# Altium footprint library 加热模块V2.4.PcbLib: 33 footprints (part 3 of 3)
Each footprint in its own frame and in the unit in brackets; x right, y up, seen from the top. Pads: shape width x height; smd on the part's side, far side on the other; paste and mask are expansions set on the pad; w line width, h text height; cw(c..) or ccw(c..) is an arc to the next point about the centre after c.
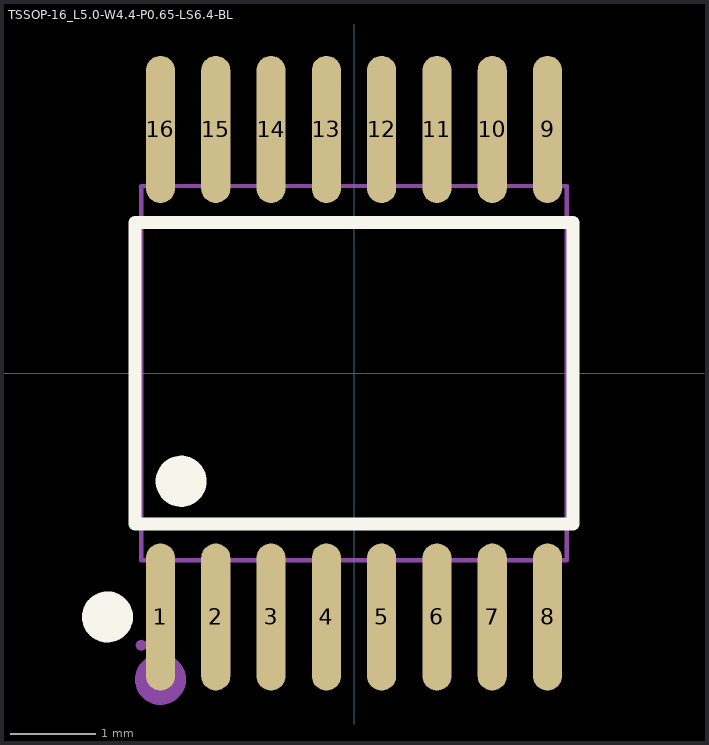
[diagram p2: the footprint, top view; thin cyan lines are the x and y axes]

## TSSOP-16_L5.0-W4.4-P0.65-LS6.4-BL [mm]
pads (16):
  oval 0.343x1.731 smd: 1(-2.275,-2.866) 2(-1.625,-2.866) 3(-0.975,-2.866) 4(-0.325,-2.866) 5(0.325,-2.866) 6(0.975,-2.866) 7(1.625,-2.866) 8(2.275,-2.866) 9(2.275,2.866) 10(1.625,2.866) 11(0.975,2.866) 12(0.325,2.866) 13(-0.325,2.866) 14(-0.975,2.866) 15(-1.625,2.866) 16(-2.275,2.866)
Top Overlay:
  circle w0.3: c-2.899,-2.866 r0.15
  circle w0.3: c-2.032,-1.27 r0.15
  lines w0.152: -2.576,-1.771 2.576,-1.771 2.576,1.772 -2.576,1.772 -2.576,-1.771
Mechanical 6:
  circle w0.3: c-2.275,-3.6 r0.15
Mechanical 15:
  region: 2.152,2.61 2.152,2.19 2.398,2.19 2.398,2.61
  region: 2.152,3.2 2.152,2.6 2.398,2.6 2.398,3.2
  region: 1.503,2.61 1.503,2.19 1.747,2.19 1.747,2.61
  region: 1.503,3.2 1.503,2.6 1.747,2.6 1.747,3.2
  region: 0.853,2.61 0.853,2.19 1.098,2.19 1.098,2.61
  region: 0.853,3.2 0.853,2.6 1.098,2.6 1.098,3.2
  region: 0.202,2.61 0.202,2.19 0.447,2.19 0.447,2.61
  region: 0.202,3.2 0.202,2.6 0.447,2.6 0.447,3.2
  region: -0.447,2.61 -0.447,2.19 -0.202,2.19 -0.202,2.61
  region: -0.447,3.2 -0.447,2.6 -0.202,2.6 -0.202,3.2
  region: -1.098,2.61 -1.098,2.19 -0.853,2.19 -0.853,2.61
  region: -1.098,3.2 -1.098,2.6 -0.853,2.6 -0.853,3.2
  region: -1.747,2.61 -1.747,2.19 -1.503,2.19 -1.503,2.61
  region: -1.747,3.2 -1.747,2.6 -1.503,2.6 -1.503,3.2
  region: -2.398,2.61 -2.398,2.19 -2.152,2.19 -2.152,2.61
  region: -2.398,3.2 -2.398,2.6 -2.152,2.6 -2.152,3.2
  region: 2.152,-2.61 2.152,-2.19 2.398,-2.19 2.398,-2.61
  region: 2.152,-3.2 2.152,-2.6 2.398,-2.6 2.398,-3.2
  region: 1.503,-2.61 1.503,-2.19 1.747,-2.19 1.747,-2.61
  region: 1.503,-3.2 1.503,-2.6 1.747,-2.6 1.747,-3.2
  region: 0.853,-2.61 0.853,-2.19 1.098,-2.19 1.098,-2.61
  region: 0.853,-3.2 0.853,-2.6 1.098,-2.6 1.098,-3.2
  region: 0.202,-2.61 0.202,-2.19 0.447,-2.19 0.447,-2.61
  region: 0.202,-3.2 0.202,-2.6 0.447,-2.6 0.447,-3.2
  region: -0.447,-2.61 -0.447,-2.19 -0.202,-2.19 -0.202,-2.61
  region: -0.447,-3.2 -0.447,-2.6 -0.202,-2.6 -0.202,-3.2
  region: -1.098,-2.61 -1.098,-2.19 -0.853,-2.19 -0.853,-2.61
  region: -1.098,-3.2 -1.098,-2.6 -0.853,-2.6 -0.853,-3.2
  region: -1.747,-2.61 -1.747,-2.19 -1.503,-2.19 -1.503,-2.61
  region: -1.747,-3.2 -1.747,-2.6 -1.503,-2.6 -1.503,-3.2
  region: -2.398,-2.61 -2.398,-2.19 -2.152,-2.19 -2.152,-2.61
  region: -2.398,-3.2 -2.398,-2.6 -2.152,-2.6 -2.152,-3.2
  region: -2.565,-3.2 -2.546,-3.246 -2.5,-3.265 -2.454,-3.246 -2.435,-3.2 -2.454,-3.154 -2.5,-3.135 -2.546,-3.154
  lines w0.051: -2.5,-2.2 2.5,-2.2 2.5,2.2 -2.5,2.2 -2.5,-2.2